# Altium footprint library INA333AIDGKR.PcbLib: 4 footprints
Each footprint in its own frame and in the unit in brackets; x right, y up, seen from the top. Pads: shape width x height; smd on the part's side, far side on the other; paste and mask are expansions set on the pad; w line width, h text height; cw(c..) or ccw(c..) is an arc to the next point about the centre after c.
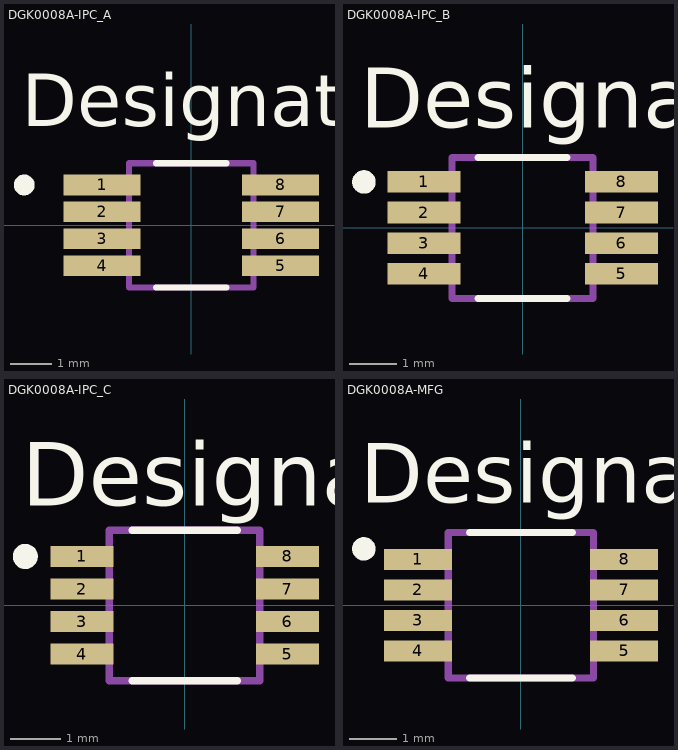
[diagram p0: the footprints below, top view; thin cyan lines are the x and y axes]

## DGK0008A-IPC_A [mm]
pads (8):
  rect 1.857x0.498 smd paste+0 mask+0: 1(-2.151,0.975) 2(-2.151,0.325) 3(-2.151,-0.325) 4(-2.151,-0.975) 5(2.151,-0.975) 6(2.151,-0.325) 7(2.151,0.325) 8(2.151,0.975)
Top Overlay:
  circle w0.25: c-4.029,0.975 r0.125
  lines w0.15: -0.848,-1.5 0.848,-1.5 ; -0.848,1.5 0.848,1.5
  text "Designator9" at -4.089,2.388 h1.27
  text ".Designator" at -3.492,-0.635 h1.27
Mechanical 13:
  lines w0.15: -1.5,-1.5 -1.5,1.5 1.5,1.5 1.5,-1.5 -1.5,-1.5
  text ".Designator" at -3.492,-0.635 h1.27

## DGK0008A-IPC_B [mm]
pads (8):
  rect 1.557x0.458 smd paste+0 mask+0: 1(-2.101,0.975) 2(-2.101,0.325) 3(-2.101,-0.325) 4(-2.101,-0.975) 5(2.101,-0.975) 6(2.101,-0.325) 7(2.101,0.325) 8(2.101,0.975)
Top Overlay:
  circle w0.25: c-3.379,0.975 r0.125
  lines w0.15: -0.948,-1.5 0.948,-1.5 ; -0.948,1.5 0.948,1.5
  text "Designator9" at -3.454,2.134 h1.27
  text ".Designator" at -3.492,-0.635 h1.27
Mechanical 13:
  lines w0.15: -1.5,-1.5 -1.5,1.5 1.5,1.5 1.5,-1.5 -1.5,-1.5
  text ".Designator" at -3.492,-0.635 h1.27

## DGK0008A-IPC_C [mm]
pads (8):
  rect 1.257x0.418 smd paste+0 mask+0: 1(-2.051,0.975) 2(-2.051,0.325) 3(-2.051,-0.325) 4(-2.051,-0.975) 5(2.051,-0.975) 6(2.051,-0.325) 7(2.051,0.325) 8(2.051,0.975)
Top Overlay:
  circle w0.25: c-3.179,0.975 r0.125
  lines w0.15: -1.048,-1.5 1.048,-1.5 ; -1.048,1.5 1.048,1.5
  text "Designator9" at -3.251,1.981 h1.27
  text ".Designator" at -3.492,-0.635 h1.27
Mechanical 13:
  lines w0.15: -1.5,-1.5 -1.5,1.5 1.5,1.5 1.5,-1.5 -1.5,-1.5
  text ".Designator" at -3.492,-0.635 h1.27

## DGK0008A-MFG [mm]
pads (8):
  rect 1.45x0.45 smd paste+0 mask+0: 1(-2.2,0.975) 2(-2.2,0.325) 3(-2.2,-0.325) 4(-2.2,-0.975) 5(2.2,-0.975) 6(2.2,-0.325) 7(2.2,0.325) 8(2.2,0.975)
Top Overlay:
  circle w0.25: c-3.35,1.2 r0.125
  lines w0.15: -1.1,-1.55 1.1,-1.55 ; -1.1,1.55 1.1,1.55
  text "Designator9" at -3.429,2.184 h1.27
  text ".Designator" at -3.492,-0.635 h1.27
Mechanical 13:
  lines w0.15: -1.55,-1.55 -1.55,1.55 1.55,1.55 1.55,-1.55 -1.55,-1.55
  text ".Designator" at -3.492,-0.635 h1.27